# Altium footprint library FootPrintLib_10.PcbLib: 270 footprints (part 9 of 17)
Each footprint in its own frame and in the unit in brackets; x right, y up, seen from the top. Pads: shape width x height; smd on the part's side, far side on the other; paste and mask are expansions set on the pad; w line width, h text height; cw(c..) or ccw(c..) is an arc to the next point about the centre after c.
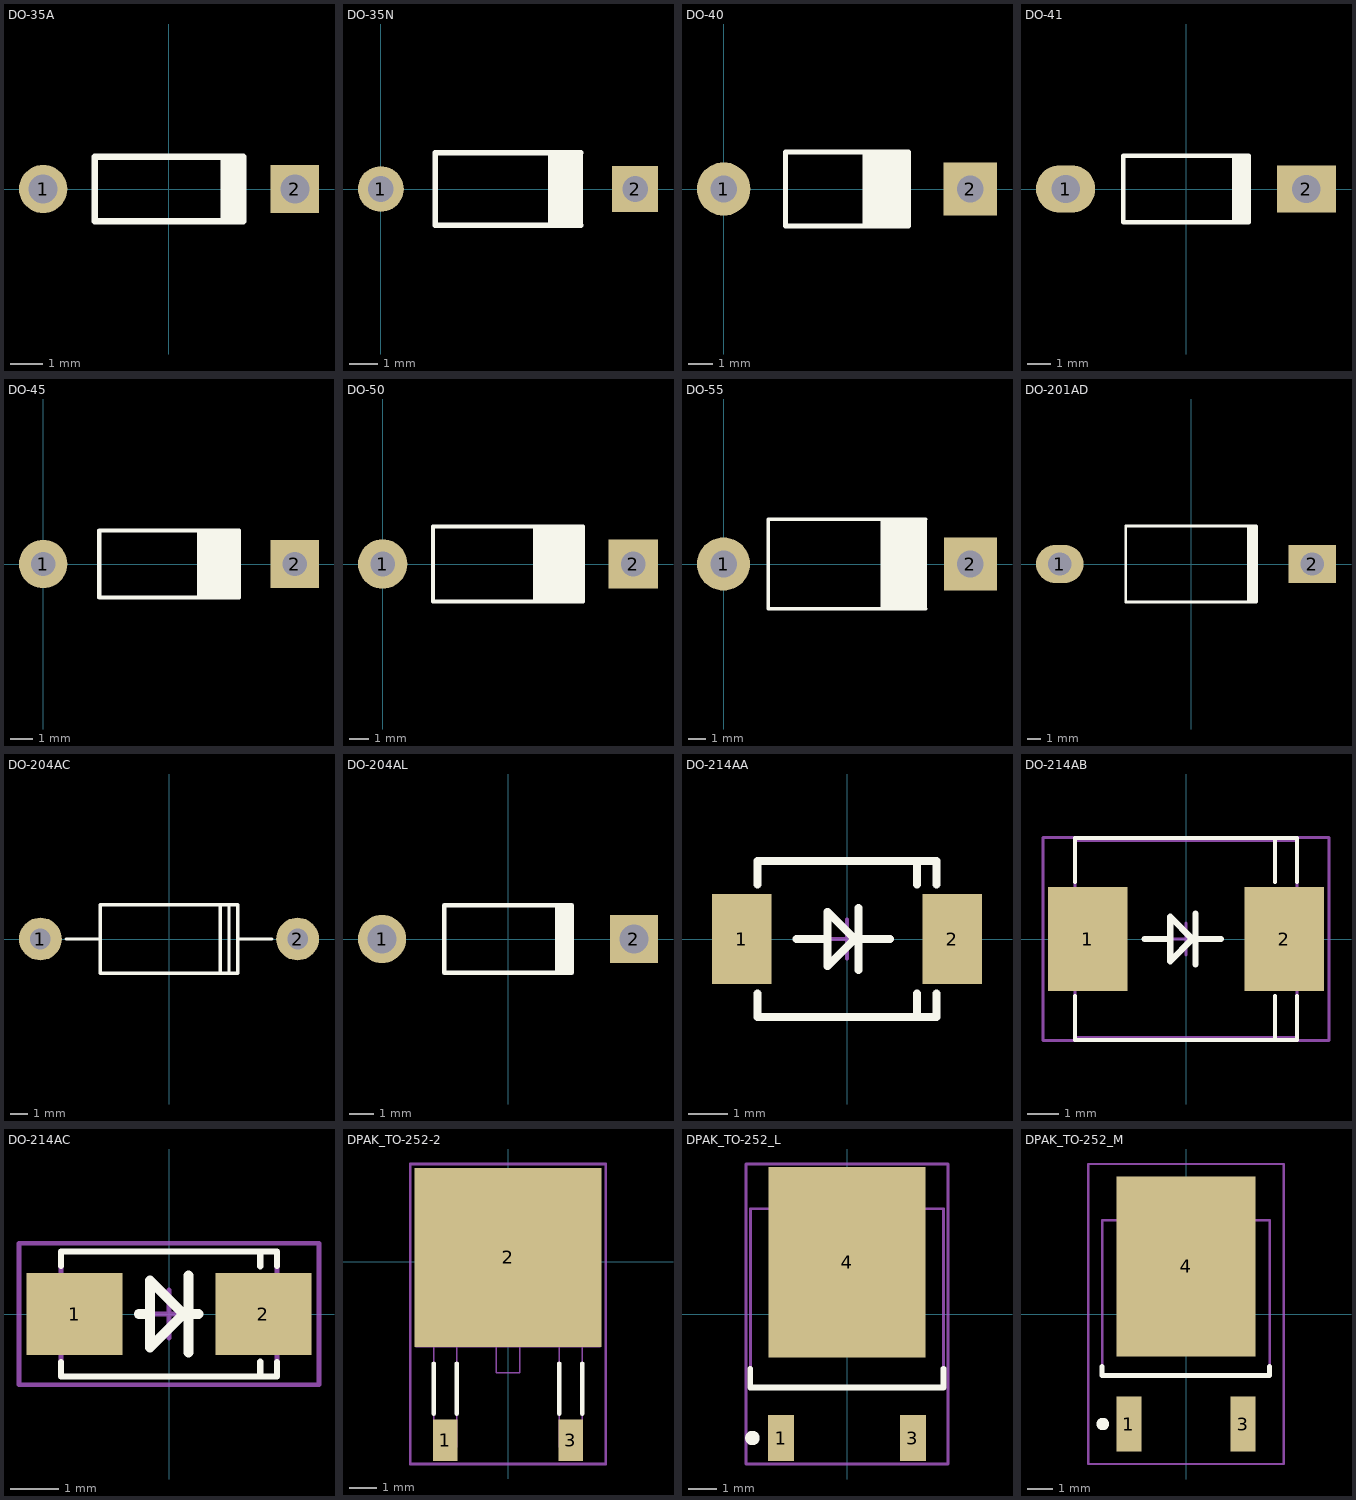
[diagram p8: the footprints below, top view; thin cyan lines are the x and y axes]

## DO-35A [mm] "Diode, Axial; Body 4.6 x 1.9 mm (LxDia. max), Lead Dia. 0.53 mm (max)"
height 2
pads (2):
  round 1.5 hole 0.9: 1(-3.9,0)
  rect 1.5x1.5 hole 0.9: 2(3.9,0)
Top Overlay:
  rectangle: 1.6,-1 2.4,1
  lines w0.2: 2.3,-1 -2.3,-1 -2.3,1 2.3,1

## DO-35N [mm] "Diode, Axial; Body 3.8 x 1.9 mm (LxDia. max), Lead Dia. 0.53 mm (max)"
height 1.9
pads (2):
  round 1.6 hole 0.9: 1(0,0)
  rect 1.6x1.6 hole 0.9: 2(8.89,0)
Top Overlay:
  rectangle: 5.842,-1.27 6.985,1.27
  lines w0.178: 6.985,-1.27 6.985,1.27
  lines w0.2: 6.985,-1.27 1.905,-1.27 1.905,1.27 6.985,1.27

## DO-40 [mm] "Diode, Axial; Body 3.8 x 1.9 mm (LxDia. max), Lead Dia. 0.53 mm (max)"
height 1.9
pads (2):
  round 2.2 hole 1.1: 1(0,0)
  rect 2.2x2.2 hole 1.1: 2(10.16,0)
Top Overlay:
  rectangle: 5.715,-1.524 7.62,1.524
  lines w0.178: 7.62,-1.524 7.62,1.524
  lines w0.2: 7.62,-1.524 2.54,-1.524 2.54,1.524 7.62,1.524

## DO-41 [mm] "Diode, Axial; Body 5.2 x 2.7 mm (LxDia. max), Lead Dia. 0.86 mm (max)"
height 2.8
pads (2):
  oval 2.5x2 hole 1.2: 1(-5.08,0)
  rect 2.5x2 hole 1.2: 2(5.08,0)
Top Overlay:
  rectangle: 1.95,-1.4 2.75,1.4
  lines w0.2: 2.65,-1.4 -2.65,-1.4 -2.65,1.4 2.65,1.4
3D body "User Library-DO-41-1.step": height 3.24, standoff -2.09, extent -5.512,-1.37 5.512,1.37

## DO-45 [mm] "Diode, Axial; Body 3.8 x 1.9 mm (LxDia. max), Lead Dia. 0.53 mm (max)"
height 1.9
pads (2):
  round 2.2 hole 1.1: 1(0,0)
  rect 2.2x2.2 hole 1.1: 2(11.43,0)
Top Overlay:
  rectangle: 6.985,-1.524 8.89,1.524
  lines w0.178: 8.89,-1.524 8.89,1.524
  lines w0.2: 8.89,-1.524 2.54,-1.524 2.54,1.524 8.89,1.524

## DO-50 [mm] "Diode, Axial; Body 3.8 x 1.9 mm (LxDia. max), Lead Dia. 0.53 mm (max)"
height 1.9
pads (2):
  round 2.5 hole 1.25: 1(0,0)
  rect 2.5x2.5 hole 1.25: 2(12.7,0)
Top Overlay:
  rectangle: 7.62,-1.905 10.16,1.905
  lines w0.178: 10.16,-1.905 10.16,1.905
  lines w0.2: 10.16,-1.905 2.54,-1.905 2.54,1.905 10.16,1.905

## DO-55 [mm] "Diode, Axial; Body 3.8 x 1.9 mm (LxDia. max), Lead Dia. 0.53 mm (max)"
height 1.9
pads (2):
  round 3 hole 1.5: 1(0,0)
  rect 3x3 hole 1.5: 2(13.97,0)
Top Overlay:
  rectangle: 8.89,-2.54 11.43,2.54
  lines w0.178: 11.43,-2.54 11.43,2.54
  lines w0.2: 11.43,-2.54 2.54,-2.54 2.54,2.54 11.43,2.54

## DO-201AD [mm] "Diode, Axial; Body 9.5 x 5.6 mm (LxDia. max), Lead Dia. 1.32 mm (max)"
height 5.6
pads (2):
  oval 3.5x2.8 hole 1.7: 1(-9.652,0)
  rect 3.5x2.8 hole 1.7: 2(8.89,0)
Top Overlay:
  rectangle: 4.1,-2.8 4.9,2.8
  lines w0.2: 4.8,-2.8 -4.8,-2.8 -4.8,2.8 4.8,2.8
3D body "User Library-DO-201ADDO-27.step": height 5.63, standoff -3.98, extent -10.451,-2.667 9.689,2.973

## DO-204AC [mm]
height 7.5
pads (2):
  round 2.5 hole 1.2: 1(-7.5,0) 2(7.5,0)
Top Overlay:
  lines w0.2: -6,0 -4,0 ; 3,-2 3,2 ; 3.5,-2 3.5,2 ; 4,0 6,0 ; -4,-2 4,-2 4,2 -4,2 -4,-2
3D body "User Library-DO-204AR-1.STEP": height 6.22, standoff -2, extent -9.525,-3.112 9.525,3.113

## DO-204AL [mm] "Diode, Axial; Body 5.2 x 2.7 mm (LxDia. max), Lead Dia. 0.86 mm (max)"
height 2.7
pads (2):
  round 2 hole 1.2: 1(-5.23,0)
  rect 2x2 hole 1.2: 2(5.23,0)
Top Overlay:
  rectangle: 1.95,-1.4 2.75,1.4
  lines w0.2: 2.65,-1.4 -2.65,-1.4 -2.65,1.4 2.65,1.4

## DO-214AA [mm] "DO-214AA(SMB) Package"
pads (2):
  rect 1.524x2.3 smd: 1(-2.7,0) 2(2.7,0)
Top Overlay:
  lines w0.203: -2.3,-1.4 -2.3,-2 2.3,-2 2.3,-1.4 ; -2.3,1.4 -2.3,2 2.3,2 2.3,1.4 ; -1.3,0 -0.6,0 ; 0.3,-0.8 0.3,0.8 ; 0.4,0 1.1,0 ; 1.8,-2 1.8,-1.4 ; 1.8,1.4 1.8,2 ; -0.5,-0.7 0.2,0 -0.5,0.7 -0.5,0.6 -0.5,-0.7
Mechanical 15:
  lines w0.1: -0.5,0 0.5,0 ; 0,-0.5 0,0.5
3D body "User Library-DO-214AA(SMB).STEP": height 2.6, standoff -0.05, extent -2.742,-1.937 2.846,2.013

## DO-214AB [mm] "DO-214AB(SMC) Package"
height 2.616
pads (2):
  rect 2.5x3.27 smd: 1(-3.09,0) 2(3.09,0)
Top Overlay:
  lines w0.127: -3.5,-1.8 -3.5,-3.175 3.5,-3.175 3.5,-1.8 ; -3.5,1.8 -3.5,3.175 3.5,3.175 3.5,1.8 ; 2.8,-3.175 2.8,-1.8 ; 2.8,1.8 2.8,3.175
  lines w0.203: -1.3,0 -0.6,0 ; 0.3,-0.8 0.3,0.8 ; 0.4,0 1.1,0 ; -0.5,-0.7 0.2,0 -0.5,0.7 -0.5,0.6 -0.5,-0.7
Mechanical 13:
  lines w0.1: -3.5,-3.1 3.5,-3.1 3.5,3.1 -3.5,3.1 -3.5,-3.1
Mechanical 15:
  lines w0.1: -0.5,0 0.5,0 ; 0,-0.5 0,0.5 ; -4.5,-3.2 -4.5,3.2 4.5,3.2 4.5,-3.2 -4.5,-3.2
3D body "User Library-Diode-DO-214AB(SMC).step": height 2.62, standoff -0.02, extent -4.064,-3.124 4.064,3.175

## DO-214AC [mm] "DO-214AC(SMA) Package"
height 2.438
pads (2):
  rect 2x1.7 smd: 1(-1.965,0) 2(1.965,0)
Top Overlay:
  lines w0.127: -2.25,-1 -2.25,-1.3 2.25,-1.3 2.25,-1 ; -2.25,1 -2.25,1.3 2.25,1.3 2.25,1 ; 1.9,-1.295 1.9,-0.995 ; 1.9,0.995 1.9,1.295
  lines w0.203: -0.632,0 -0.495,0 ; 0.405,-0.8 0.405,0.8 ; 0.505,0 0.613,0 ; -0.395,-0.7 -0.395,0.7 0.305,0 -0.395,-0.7
Mechanical 13:
  lines w0.1: -2.25,-1.3 -2.25,1.3 2.25,1.3 2.25,-1.3 -2.25,-1.3
Mechanical 15:
  lines w0.1: -0.5,0 0.5,0 ; 0,-0.5 0,0.5 ; -3.124,-1.473 -3.124,1.473 3.124,1.473 3.124,-1.473 -3.124,-1.473
3D body "User Library-DIOM5528X26.STEP": height 2.6, standoff 0.03, extent -2.757,-1.403 2.743,1.397

## DPAK_TO-252-2 [mil] "D-PAK, 3-Pads, TO-252-2"
pads (3):
  rect 35x60 smd: 1(-89.96,-256) 3(89.96,-256)
  rect 267.72x255.91 smd: 2(0,6)
Top Overlay:
  lines w6: -106.46,-218 -106.46,-146 ; -73.46,-218 -73.46,-146 ; 73.46,-218 73.46,-146 ; 106.46,-218 106.46,-146
Mechanical 13:
  lines w2: -16.5,-122 -16.5,-159 16.5,-159 16.5,-122 ; -132.5,-122 132.5,-122 132.5,122 -132.5,122 -132.5,-122 ; -106.46,-266 -106.46,-122 -73.46,-122 -73.46,-266 -106.46,-266 ; 73.46,-266 73.46,-122 106.46,-122 106.46,-266 73.46,-266
Mechanical 15:
  lines w4: -19.68,0 19.68,0 ; 0,-19.68 0,19.68 ; -140,-290 -140,140 140,140 140,-290 -140,-290
3D body "User Library-TO-252AA-DPAK.step": height 93.31, standoff -1.18, extent -132.56,-270 132.56,127.64

## DPAK_TO-252_L [mm] "D-PAK, 4-Leads, Body 6.1x6.6mm, Pitch 2.29mm, Lead Span 9.7mm, IPC High Density"
height 2.38
pads (3):
  rect 0.9x1.6 smd: 1(-2.28,-4.3) 3(2.28,-4.3)
  rect 5.45x6.6 smd: 4(0,1.8)
Top Overlay:
  circle w0.25: c-3.28,-4.3 r0.125
  lines w0.2: -3.35,-1.9 -3.35,-2.55 3.35,-2.55 3.35,-1.9
Mechanical 13:
  lines w0.1: -3.35,-2.55 3.35,-2.55 3.35,3.65 -3.35,3.65 -3.35,-2.55
Mechanical 15:
  lines w0.1: -0.5,0 0.5,0 ; 0,-0.5 0,0.5 ; -3.5,-5.2 3.5,-5.2 3.5,5.2 -3.5,5.2 -3.5,-5.2
3D body "DPAK.STEP": height 2.34, standoff -0.07, extent -3.27,-5.176 3.27,4.762

## DPAK_TO-252_M [mm] "D-PAK, 4-Leads, Body 6.1x6.6mm, Pitch 2.29mm, Lead Span 9.7mm, IPC Low Density"
height 2.38
pads (3):
  rect 1x2.2 smd: 1(-2.28,-4.4) 3(2.28,-4.4)
  rect 5.55x7.2 smd: 4(0,1.9)
Top Overlay:
  circle w0.25: c-3.33,-4.4 r0.125
  lines w0.2: -3.35,-2.1 -3.35,-2.45 3.35,-2.45 3.35,-2.1
Mechanical 13:
  lines w0.1: -3.35,-2.45 3.35,-2.45 3.35,3.75 -3.35,3.75 -3.35,-2.45
Mechanical 15:
  lines w0.1: -0.5,0 0.5,0 ; 0,-0.5 0,0.5 ; -3.9,-6 3.9,-6 3.9,6 -3.9,6 -3.9,-6
3D body "DPAK.STEP": height 2.34, standoff -0.07, extent -3.27,-5.176 3.27,4.762